# Altium footprint library Connector-FemaleHDR.PcbLib: 66 footprints (part 5 of 5)
Each footprint in its own frame and in the unit in brackets; x right, y up, seen from the top. Pads: shape width x height; smd on the part's side, far side on the other; paste and mask are expansions set on the pad; w line width, h text height; cw(c..) or ccw(c..) is an arc to the next point about the centre after c.
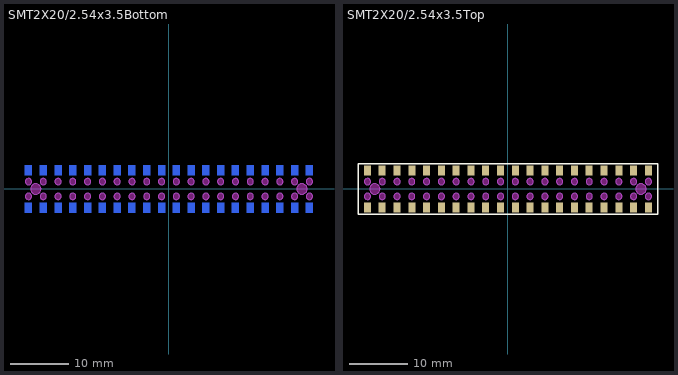
[diagram p4: the footprints below, top view; thin cyan lines are the x and y axes]

## SMT2X20/2.54x3.5Bottom [mm]
pads (40):
  rect 1.2x1.7 smd far side: 1(-24.13,-3.2) 2(-24.13,3.2) 3(-21.59,-3.2) 4(-21.59,3.2) 5(-19.05,-3.2) 6(-19.05,3.2) 7(-16.51,-3.2) 8(-16.51,3.2) 9(-13.97,-3.2) 10(-13.97,3.2) 11(-11.43,-3.2) 12(-11.43,3.2) 13(-8.89,-3.2) 14(-8.89,3.2) 15(-6.35,-3.2) 16(-6.35,3.2) 17(-3.81,-3.2) 18(-3.81,3.2) 19(-1.27,-3.2) 20(-1.27,3.2) 21(1.27,-3.2) 22(1.27,3.2) 23(3.81,-3.2) 24(3.81,3.2) 25(6.35,-3.2) 26(6.35,3.2) 27(8.89,-3.2) 28(8.89,3.2) 29(11.43,-3.2) 30(11.43,3.2) 31(13.97,-3.2) 32(13.97,3.2) 33(16.51,-3.2) 34(16.51,3.2) 35(19.05,-3.2) 36(19.05,3.2) 37(21.59,-3.2) 38(21.59,3.2) 39(24.13,-3.2) 40(24.13,3.2)
Bottom Overlay:
  lines w0.254: 25.751,-4.318 -25.751,-4.318 -25.72,-4.318 -25.72,4.317 25.781,4.317 25.781,-4.318
Keep-Out Layer:
  drawing of 43 lines, arcs and shapes, not listed
Board Outline:
  circle w0.1: c-22.86,0 r0.9
  circle w0.1: c22.86,0 r0.9
  circle w0.05: c1.27,1.27 r0.55
  circle w0.05: c24.13,1.27 r0.55
  circle w0.05: c3.81,1.27 r0.55
  circle w0.05: c-16.51,1.27 r0.55
  circle w0.05: c-1.27,1.27 r0.55
  circle w0.05: c-3.81,1.27 r0.55
  circle w0.05: c-13.97,1.27 r0.55
  circle w0.05: c-11.43,1.27 r0.55
  circle w0.05: c-8.89,1.27 r0.55
  circle w0.05: c-6.35,1.27 r0.55
  circle w0.05: c-21.59,1.27 r0.55
  circle w0.05: c-19.05,1.27 r0.55
  circle w0.05: c16.51,1.27 r0.55
  circle w0.05: c21.59,1.27 r0.55
  circle w0.05: c6.35,1.27 r0.55
  circle w0.05: c11.43,1.27 r0.55
  circle w0.05: c19.05,1.27 r0.55
  circle w0.05: c8.89,1.27 r0.55
  circle w0.05: c13.97,1.27 r0.55
  circle w0.05: c-24.13,1.27 r0.55
  circle w0.05: c24.13,-1.27 r0.55
  circle w0.05: c16.51,-1.27 r0.55
  circle w0.05: c3.81,-1.27 r0.55
  circle w0.05: c21.59,-1.27 r0.55
  circle w0.05: c19.05,-1.27 r0.55
  circle w0.05: c11.43,-1.27 r0.55
  circle w0.05: c13.97,-1.27 r0.55
  circle w0.05: c6.35,-1.27 r0.55
  circle w0.05: c8.89,-1.27 r0.55
  circle w0.05: c-1.27,-1.27 r0.55
  circle w0.05: c-8.89,-1.27 r0.55
  circle w0.05: c-6.35,-1.27 r0.55
  circle w0.05: c-16.51,-1.27 r0.55
  circle w0.05: c-19.05,-1.27 r0.55
  circle w0.05: c-13.97,-1.27 r0.55
  circle w0.05: c-21.59,-1.27 r0.55
  circle w0.05: c-11.43,-1.27 r0.55
  circle w0.05: c1.27,-1.27 r0.55
  circle w0.05: c-3.81,-1.27 r0.55
  circle w0.05: c-24.13,-1.27 r0.55
3D body "2.54-3.55.STEP": height -0.45, standoff -4.37, extent -25.546,-3.644 25.654,3.556

## SMT2X20/2.54x3.5Top [mm]
pads (40):
  rect 1.2x1.7 smd: 1(-24.13,-3.2) 2(-24.13,3.2) 3(-21.59,-3.2) 4(-21.59,3.2) 5(-19.05,-3.2) 6(-19.05,3.2) 7(-16.51,-3.2) 8(-16.51,3.2) 9(-13.97,-3.2) 10(-13.97,3.2) 11(-11.43,-3.2) 12(-11.43,3.2) 13(-8.89,-3.2) 14(-8.89,3.2) 15(-6.35,-3.2) 16(-6.35,3.2) 17(-3.81,-3.2) 18(-3.81,3.2) 19(-1.27,-3.2) 20(-1.27,3.2) 21(1.27,-3.2) 22(1.27,3.2) 23(3.81,-3.2) 24(3.81,3.2) 25(6.35,-3.2) 26(6.35,3.2) 27(8.89,-3.2) 28(8.89,3.2) 29(11.43,-3.2) 30(11.43,3.2) 31(13.97,-3.2) 32(13.97,3.2) 33(16.51,-3.2) 34(16.51,3.2) 35(19.05,-3.2) 36(19.05,3.2) 37(21.59,-3.2) 38(21.59,3.2) 39(24.13,-3.2) 40(24.13,3.2)
Top Overlay:
  lines w0.254: 25.751,-4.318 -25.751,-4.318 -25.72,-4.318 -25.72,4.317 25.781,4.317 25.781,-4.318
Bottom Overlay:
  lines w0.254: 25.751,-4.318 -25.751,-4.318 -25.72,-4.318 -25.72,4.317 25.781,4.317 25.781,-4.318
Keep-Out Layer:
  drawing of 43 lines, arcs and shapes, not listed
Board Outline:
  circle w0.05: c-24.13,-1.27 r0.55
  circle w0.05: c-3.81,-1.27 r0.55
  circle w0.05: c1.27,-1.27 r0.55
  circle w0.05: c-11.43,-1.27 r0.55
  circle w0.05: c-21.59,-1.27 r0.55
  circle w0.05: c-13.97,-1.27 r0.55
  circle w0.05: c-19.05,-1.27 r0.55
  circle w0.05: c-16.51,-1.27 r0.55
  circle w0.05: c-6.35,-1.27 r0.55
  circle w0.05: c-8.89,-1.27 r0.55
  circle w0.05: c-1.27,-1.27 r0.55
  circle w0.05: c8.89,-1.27 r0.55
  circle w0.05: c6.35,-1.27 r0.55
  circle w0.05: c13.97,-1.27 r0.55
  circle w0.05: c11.43,-1.27 r0.55
  circle w0.05: c19.05,-1.27 r0.55
  circle w0.05: c21.59,-1.27 r0.55
  circle w0.05: c3.81,-1.27 r0.55
  circle w0.05: c16.51,-1.27 r0.55
  circle w0.05: c24.13,-1.27 r0.55
  circle w0.05: c-24.13,1.27 r0.55
  circle w0.05: c13.97,1.27 r0.55
  circle w0.05: c8.89,1.27 r0.55
  circle w0.05: c19.05,1.27 r0.55
  circle w0.05: c11.43,1.27 r0.55
  circle w0.05: c6.35,1.27 r0.55
  circle w0.05: c21.59,1.27 r0.55
  circle w0.05: c16.51,1.27 r0.55
  circle w0.05: c-19.05,1.27 r0.55
  circle w0.05: c-21.59,1.27 r0.55
  circle w0.05: c-6.35,1.27 r0.55
  circle w0.05: c-8.89,1.27 r0.55
  circle w0.05: c-11.43,1.27 r0.55
  circle w0.05: c-13.97,1.27 r0.55
  circle w0.05: c-3.81,1.27 r0.55
  circle w0.05: c-1.27,1.27 r0.55
  circle w0.05: c-16.51,1.27 r0.55
  circle w0.05: c3.81,1.27 r0.55
  circle w0.05: c24.13,1.27 r0.55
  circle w0.05: c1.27,1.27 r0.55
  circle w0.1: c22.86,0 r0.9
  circle w0.1: c-22.86,0 r0.9
3D body "2.54-3.55.STEP": height -0.45, standoff -4.37, extent -25.546,-3.644 25.654,3.556